# Altium schematic symbol library A7670C-LASE.SCHLIB: 1 symbol
Pins are listed as number, name and electrical type; pins without a type are passive.

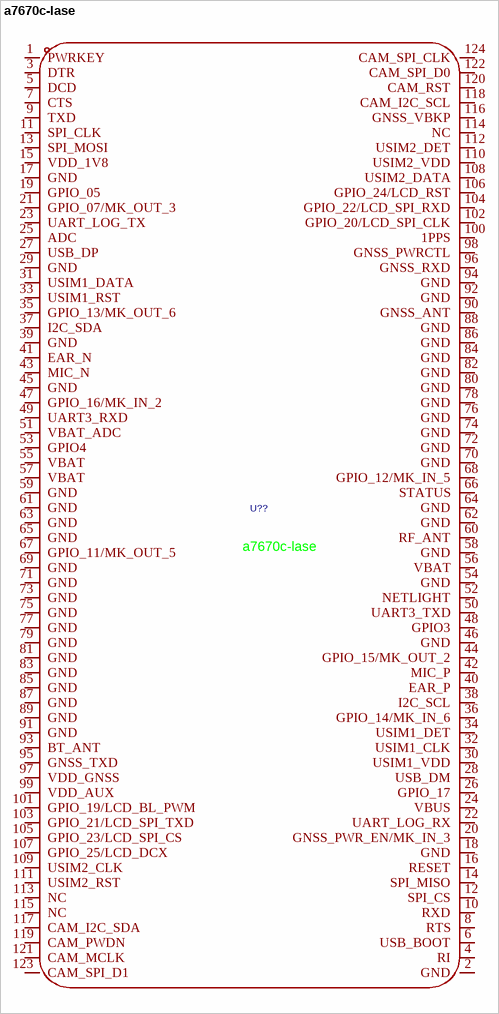
[diagram p0: symbol a7670c-lase]

## a7670c-lase
designator U??
Communication System:GSM；LTE；EDGE；GPRS Interface:I2C；UART；USB；GPIO；ADC Communication Frequency:- Voltage - Supply:3.4V~4.2V Voltage - Supply:3.4V~4.2V Current Consumption:- Features:DFOTA function Operating Temperature:-40℃~+85℃ Operating Temperature:-40℃; Manufacturer: SIMCOM(芯讯通无线科技); AddInBom: yes; ModelId: 639229647ea0411984ffffd09147ce72; ModelName: LGA-124_L24.0-W24.0-P1.0-A7670C-LASS; ModelTransform: 944.88,944.88,0,0,0,0,0,0,0; Symbol: A7670C-LASE; Supplier: LCSC; Supplier Part: C2888406; Manufacturer Part: A7670C-LASE; JLCPCB Part Class: Extended Part; LCSC Part Name: SIMCom LTE Cat 1 模块; Supplier Footprint: SMD,24x24mm; Datasheet: https://item.szlcsc.com/datasheet/A7670C-LASE/3108740.html; ConvertToPcb: yes; FootprintName: LGA-124_L24.0-W24.0-P1.0-A7670C-LASS; Communication System: GSM；LTE；EDGE；GPRS; Interface: I2C；UART；USB；GPIO；ADC; Communication Frequency: -; Voltage - Supply: 3.4V~4.2V; Current Consumption: -; Features: DFOTA function; Operating Temperature: -40℃~+85℃
footprint LGA-124_L24.0-W24.0-P1.0-A7670C-LASS
pins: 1 PWRKEY, 2 GND, 3 DTR, 4 RI, 5 DCD, 6 USB_BOOT, 7 CTS, 8 RTS, 9 TXD, 10 RXD, 11 SPI_CLK, 12 SPI_CS, 13 SPI_MOSI, 14 SPI_MISO, 15 VDD_1V8, 16 RESET, 17 GND, 18 GND, 19 GPIO_05, 20 GNSS_PWR_EN/MK_IN_3, 21 GPIO_07/MK_OUT_3, 22 UART_LOG_RX, 23 UART_LOG_TX, 24 VBUS, 25 ADC, 26 GPIO_17, 27 USB_DP, 28 USB_DM, 29 GND, 30 USIM1_VDD, 31 USIM1_DATA, 32 USIM1_CLK, 33 USIM1_RST, 34 USIM1_DET, 35 GPIO_13/MK_OUT_6, 36 GPIO_14/MK_IN_6, 37 I2C_SDA, 38 I2C_SCL, 39 GND, 40 EAR_P, 41 EAR_N, 42 MIC_P, 43 MIC_N, 44 GPIO_15/MK_OUT_2, 45 GND, 46 GND, 47 GPIO_16/MK_IN_2, 48 GPIO3, 49 UART3_RXD, 50 UART3_TXD, 51 VBAT_ADC, 52 NETLIGHT, 53 GPIO4, 54 GND, 55 VBAT, 56 VBAT, 57 VBAT, 58 GND, 59 GND, 60 RF_ANT, 61 GND, 62 GND, 63 GND, 64 GND, 65 GND, 66 STATUS, 67 GPIO_11/MK_OUT_5, 68 GPIO_12/MK_IN_5, 69 GND, 70 GND, 71 GND, 72 GND, 73 GND, 74 GND, 75 GND, 76 GND, 77 GND, 78 GND, 79 GND, 80 GND, 81 GND, 82 GND, 83 GND, 84 GND, 85 GND, 86 GND, 87 GND, 88 GND, 89 GND, 90 GNSS_ANT, 91 GND, 92 GND, 93 BT_ANT, 94 GND, 95 GNSS_TXD, 96 GNSS_RXD, 97 VDD_GNSS, 98 GNSS_PWRCTL, 99 VDD_AUX, 100 1PPS, 101 GPIO_19/LCD_BL_PWM, 102 GPIO_20/LCD_SPI_CLK, 103 GPIO_21/LCD_SPI_TXD, 104 GPIO_22/LCD_SPI_RXD, 105 GPIO_23/LCD_SPI_CS, 106 GPIO_24/LCD_RST, 107 GPIO_25/LCD_DCX, 108 USIM2_DATA, 109 USIM2_CLK, 110 USIM2_VDD, 111 USIM2_RST, 112 USIM2_DET, 113 NC, 114 NC, 115 NC, 116 GNSS_VBKP, 117 CAM_I2C_SDA, 118 CAM_I2C_SCL, 119 CAM_PWDN, 120 CAM_RST, 121 CAM_MCLK, 122 CAM_SPI_D0, 123 CAM_SPI_D1, 124 CAM_SPI_CLK